# Altium footprint library SamacSys.PcbLib: 1008 footprints (part 31 of 63)
Each footprint in its own frame and in the unit in brackets; x right, y up, seen from the top. Pads: shape width x height; smd on the part's side, far side on the other; paste and mask are expansions set on the pad; w line width, h text height; cw(c..) or ccw(c..) is an arc to the next point about the centre after c.
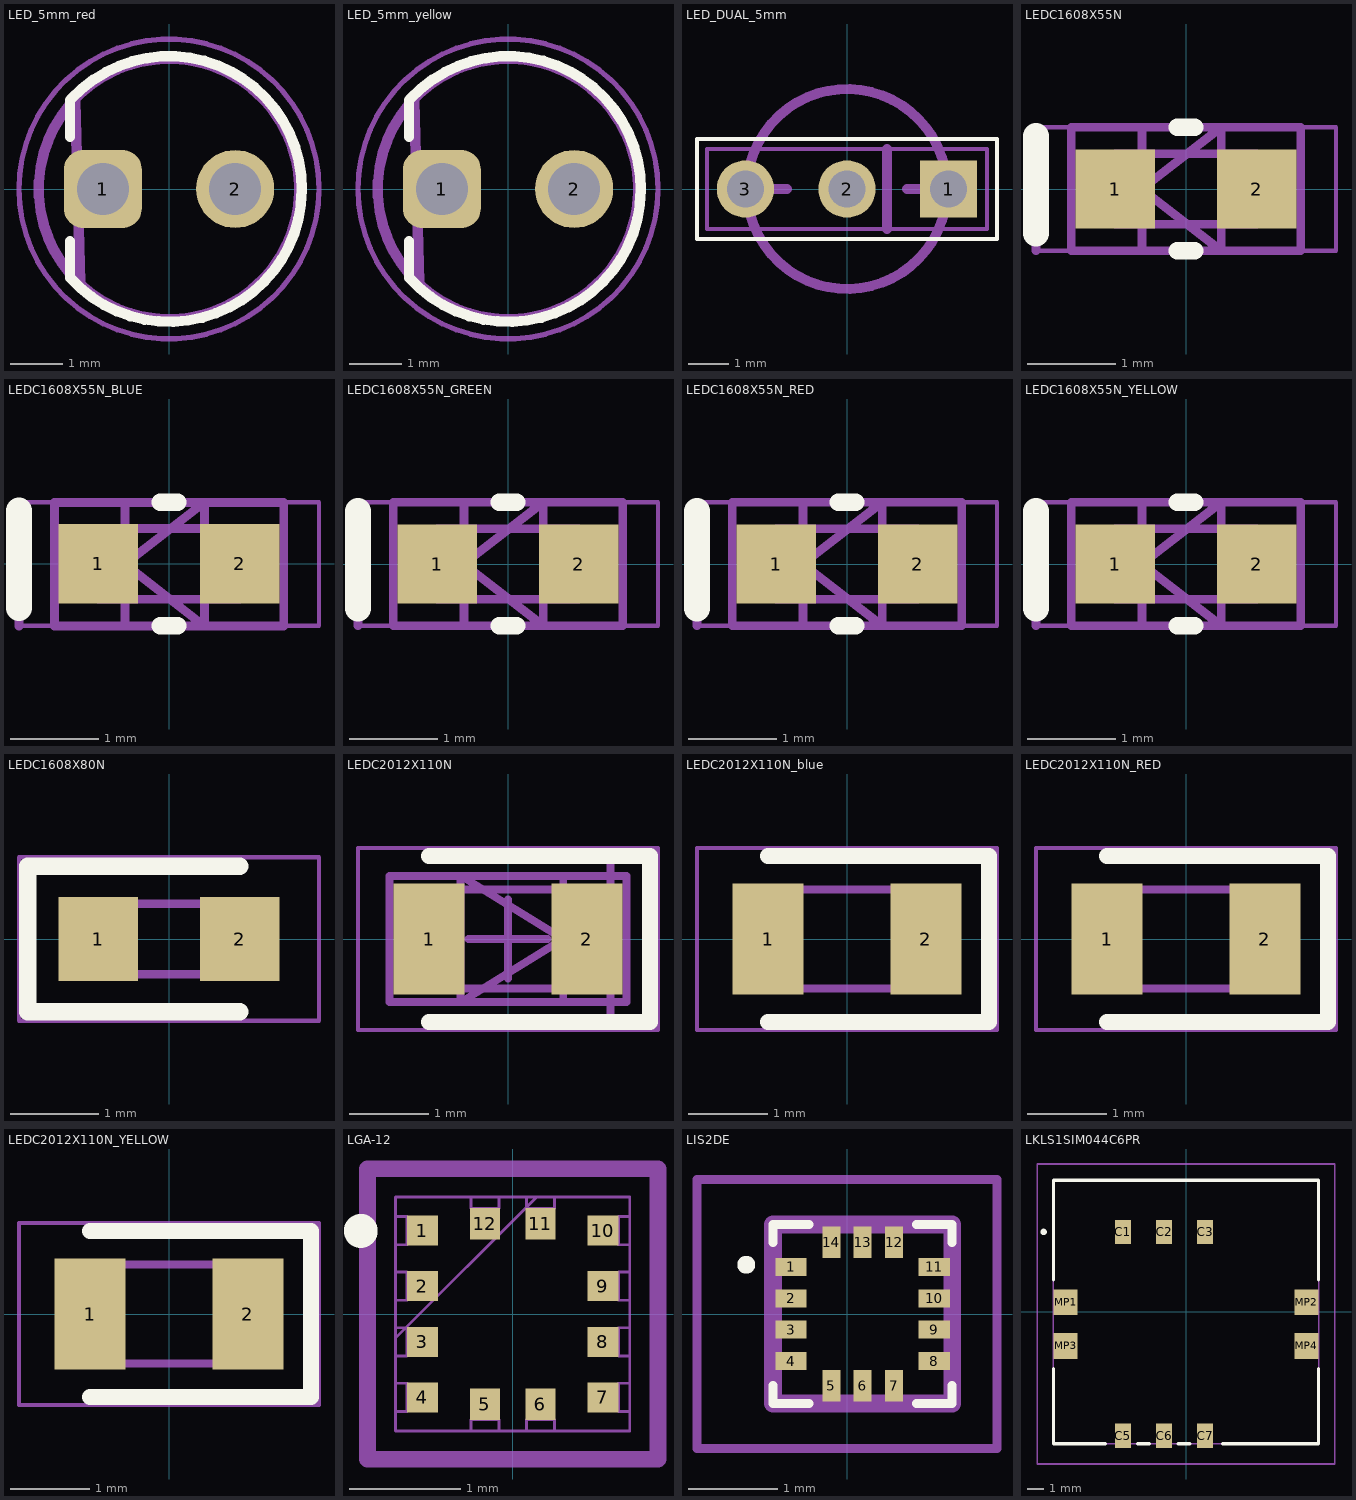
[diagram p30: the footprints below, top view; thin cyan lines are the x and y axes]

## LED_5mm_red [mm]
pads (2):
  rrect50% 1.5x1.5 hole 1: 1(-1.27,0)
  round 1.5 hole 1: 2(1.27,0)
Top Overlay:
  lines w0.2: -1.9,-1 -1.9,-1.7 ccw(c0,0) -1.873,1.729 ; -1.9,1 -1.9,1.7
Assembly:
  circle w0.2: c0,0 r2.5
  lines w0.2: -1.8,1.7 -1.7,-1.8
Countryard:
  circle w0.1: c0,0 r2.879
3D body "LED D5 - Red.step": height 19.6, standoff -15.4, extent -2.5,-2.944 2.95,2.944

## LED_5mm_yellow [mm]
pads (2):
  rrect50% 1.5x1.5 hole 1: 1(-1.27,0)
  round 1.5 hole 1: 2(1.27,0)
Top Overlay:
  lines w0.2: -1.9,-1 -1.9,-1.7 ccw(c0,0) -1.873,1.729 ; -1.9,1 -1.9,1.7
Assembly:
  circle w0.2: c0,0 r2.5
  lines w0.2: -1.8,1.7 -1.7,-1.8
Countryard:
  circle w0.1: c0,0 r2.879
3D body "LED D5 - Yellow.step": height 19.6, standoff -15.4, extent -2.409,-3.022 3.041,2.866

## LED_DUAL_5mm [mm] "LED 5MM, BI-COLOR"
pads (3):
  rect 1.431x1.431 hole 0.92: 1(2.54,0)
  round 1.431 hole 0.92: 2(0,0) 3(-2.54,0)
Top Overlay:
  lines w0.1: -3.75,-1.25 3.75,-1.25 3.75,1.25 -3.75,1.25 -3.75,-1.25
Top Assembly:
  circle w0.25: c0,0 r2.5
  lines w0.25: -2.54,0 -1.5,0 ; 1,-1 1,1 ; 1.5,0 2.54,0
Top Courtyard:
  lines w0.1: -3.5,-1 3.5,-1 3.5,1 -3.5,1 -3.5,-1
3D body "Bi-Color LED - Common Cathode v3.step": height 24.3, standoff -9.5, extent -2.79,-1.986 2.75,1.786

## LEDC1608X55N [mm]
pads (2):
  rect 0.9x0.9 smd: 1(-0.8,0) 2(0.8,0)
Top Overlay:
  lines w0.2: -0.1,-0.7 0.1,-0.7 ; -0.1,0.7 0.1,0.7
  lines w0.3: -1.7,-0.5 -1.7,0.6
Top Assembly:
  lines w0.1: -1.7,-0.7 -1.7,0.7 ; -0.5,-0.7 -0.5,0.7 ; -1.3,-0.7 1.3,-0.7 1.3,0.7 -1.3,0.7 -1.3,-0.7 ; -0.5,0 0.4,0.7 0.4,-0.7 -0.5,0
Assembly:
  lines w0.1: -0.8,0.133 -0.533,0.4 ; -0.8,-0.4 -0.8,0.4 0.8,0.4 0.8,-0.4 -0.8,-0.4
Countryard:
  lines w0.05: -1.7,-0.7 -1.7,0.7 1.7,0.7 1.7,-0.7 -1.7,-0.7
3D body "LTST-C191KGKT.stp": height 0.55, standoff 0, extent -0.83,-0.4 0.77,0.4

## LEDC1608X55N_BLUE [mm]
pads (2):
  rect 0.9x0.9 smd: 1(-0.8,0) 2(0.8,0)
Top Overlay:
  lines w0.2: -0.1,-0.7 0.1,-0.7 ; -0.1,0.7 0.1,0.7
  lines w0.3: -1.7,-0.5 -1.7,0.6
Top Assembly:
  lines w0.1: -1.699,-0.702 -1.699,0.698 ; -0.499,-0.702 -0.499,0.698 ; -1.299,-0.702 1.301,-0.702 1.301,0.698 -1.299,0.698 -1.299,-0.702 ; -0.499,-0.002 0.401,-0.702 0.401,0.698 -0.499,-0.002
Assembly:
  lines w0.1: -0.8,0.133 -0.533,0.4 ; -0.8,-0.4 -0.8,0.4 0.8,0.4 0.8,-0.4 -0.8,-0.4
Countryard:
  lines w0.05: -1.7,-0.7 -1.7,0.7 1.7,0.7 1.7,-0.7 -1.7,-0.7
3D body "SMD_0603LED_BLUE.STEP": height 0.88, standoff 0, extent -0.838,-0.5 0.778,0.5

## LEDC1608X55N_GREEN [mm]
pads (2):
  rect 0.9x0.9 smd: 1(-0.8,0) 2(0.8,0)
Top Overlay:
  lines w0.2: -0.1,-0.7 0.1,-0.7 ; -0.1,0.7 0.1,0.7
  lines w0.3: -1.7,-0.5 -1.7,0.6
Top Assembly:
  lines w0.1: -1.7,-0.7 -1.7,0.7 ; -0.5,-0.7 -0.5,0.7 ; -1.3,-0.7 1.3,-0.7 1.3,0.7 -1.3,0.7 -1.3,-0.7 ; -0.5,0 0.4,-0.7 0.4,0.7 -0.5,0
Assembly:
  lines w0.1: -0.8,0.133 -0.533,0.4 ; -0.8,-0.4 -0.8,0.4 0.8,0.4 0.8,-0.4 -0.8,-0.4
Countryard:
  lines w0.05: -1.7,-0.7 -1.7,0.7 1.7,0.7 1.7,-0.7 -1.7,-0.7
3D body "SMD_0603LED_GREEN.STEP": height 0.88, standoff 0, extent -0.838,-0.5 0.778,0.5

## LEDC1608X55N_RED [mm]
pads (2):
  rect 0.9x0.9 smd: 1(-0.8,0) 2(0.8,0)
Top Overlay:
  lines w0.2: -0.1,-0.7 0.1,-0.7 ; -0.1,0.7 0.1,0.7
  lines w0.3: -1.7,-0.5 -1.7,0.6
Top Assembly:
  lines w0.1: -1.7,-0.7 -1.7,0.7 ; -0.5,-0.7 -0.5,0.7 ; -1.3,-0.7 1.3,-0.7 1.3,0.7 -1.3,0.7 -1.3,-0.7 ; -0.5,0 0.4,-0.7 0.4,0.7 -0.5,0
Assembly:
  lines w0.1: -0.8,0.133 -0.533,0.4 ; -0.8,-0.4 0.8,-0.4 0.8,0.4 -0.8,0.4 -0.8,-0.4
Countryard:
  lines w0.05: -1.7,-0.7 1.7,-0.7 1.7,0.7 -1.7,0.7 -1.7,-0.7
3D body "SMD_0603LED_RED.STEP": height 0.88, standoff 0, extent -0.838,-0.5 0.778,0.5

## LEDC1608X55N_YELLOW [mm]
pads (2):
  rect 0.9x0.9 smd: 1(-0.8,0) 2(0.8,0)
Top Overlay:
  lines w0.2: -0.1,-0.7 0.1,-0.7 ; -0.1,0.7 0.1,0.7
  lines w0.3: -1.7,-0.5 -1.7,0.6
Top Assembly:
  lines w0.1: -1.7,-0.7 -1.7,0.7 ; -0.5,-0.7 -0.5,0.7 ; -1.3,-0.7 1.3,-0.7 1.3,0.7 -1.3,0.7 -1.3,-0.7 ; -0.5,0 0.4,0.7 0.4,-0.7 -0.5,0
Assembly:
  lines w0.1: -0.8,0.133 -0.533,0.4 ; -0.8,-0.4 -0.8,0.4 0.8,0.4 0.8,-0.4 -0.8,-0.4
Countryard:
  lines w0.05: -1.7,-0.7 -1.7,0.7 1.7,0.7 1.7,-0.7 -1.7,-0.7
3D body "SMD_0603LED_YEL.STEP": height 0.88, standoff 0, extent -0.838,-0.5 0.778,0.5

## LEDC1608X80N [mm]
pads (2):
  rect 0.9x0.95 smd: 1(-0.8,0) 2(0.8,0)
Top Overlay:
  lines w0.2: 0.8,-0.825 -1.6,-0.825 -1.6,0.825 0.8,0.825
Assembly:
  lines w0.1: -0.8,0.133 -0.533,0.4 ; -0.8,-0.4 0.8,-0.4 0.8,0.4 -0.8,0.4 -0.8,-0.4
Countryard:
  lines w0.05: -1.7,-0.925 1.7,-0.925 1.7,0.925 -1.7,0.925 -1.7,-0.925
3D body "LTST-C190KGKT.stp": height 0.8, standoff 0, extent -0.83,-0.4 0.77,0.4

## LEDC2012X110N [mm]
pads (2):
  rect 0.9x1.4 smd: 1(-1,0) 2(1,0)
Top Overlay:
  lines w0.2: -1,-1.05 1.8,-1.05 1.8,1.05 -1,1.05
Top Assembly:
  lines w0.1: 0.7,-0.8 0.7,0.8 ; -1.5,-0.8 -1.5,0.8 1.5,0.8 1.5,-0.8 -1.5,-0.8 ; -0.6,-0.8 0.7,0 -0.6,0.8 -0.6,-0.8
Assembly:
  lines w0.1: -1,0.208 -0.583,0.625 ; -1,-0.625 1,-0.625 1,0.625 -1,0.625 -1,-0.625
Countryard:
  lines w0.05: -1.9,-1.15 1.9,-1.15 1.9,1.15 -1.9,1.15 -1.9,-1.15
  lines w0.1: -0.5,0 0.5,0 ; 0,-0.5 0,0.5 ; 1.3,-1.1 1.3,1.1
3D body "User Library-KP-2012.step": height 1.1, standoff 0, extent -1.001,-0.625 1.001,0.625

## LEDC2012X110N_blue [mm]
pads (2):
  rect 0.9x1.4 smd: 1(-1,0) 2(1,0)
Top Overlay:
  lines w0.2: -1,-1.05 1.8,-1.05 1.8,1.05 -1,1.05
Assembly:
  lines w0.1: -1,0.208 -0.583,0.625 ; -1,-0.625 -1,0.625 1,0.625 1,-0.625 -1,-0.625
Countryard:
  lines w0.05: -1.9,-1.15 -1.9,1.15 1.9,1.15 1.9,-1.15 -1.9,-1.15
3D body "everlight-17-21-0805LED-BLUE.step": height 1.1, standoff -0.01, extent -1,-0.625 1,0.625

## LEDC2012X110N_RED [mm]
pads (2):
  rect 0.9x1.4 smd: 1(-1,0) 2(1,0)
Top Overlay:
  lines w0.2: -1,-1.05 1.8,-1.05 1.8,1.05 -1,1.05
Assembly:
  lines w0.1: -1,0.208 -0.583,0.625 ; -1,-0.625 1,-0.625 1,0.625 -1,0.625 -1,-0.625
Countryard:
  lines w0.05: -1.9,-1.15 1.9,-1.15 1.9,1.15 -1.9,1.15 -1.9,-1.15
3D body "User Library-CHIPLED-0805.step": height 0.9, standoff -0.01, extent -1.05,-0.675 1.05,0.675

## LEDC2012X110N_YELLOW [mm]
pads (2):
  rect 0.9x1.4 smd: 1(-1,0) 2(1,0)
Top Overlay:
  lines w0.2: -1,-1.05 1.8,-1.05 1.8,1.05 -1,1.05
Assembly:
  lines w0.1: -1,0.208 -0.583,0.625 ; -1,-0.625 1,-0.625 1,0.625 -1,0.625 -1,-0.625
Countryard:
  lines w0.05: -1.9,-1.15 1.9,-1.15 1.9,1.15 -1.9,1.15 -1.9,-1.15
3D body "SMD_0805LED_YEL.STEP": height 1.1, standoff 0, extent -1.01,-0.625 1.01,0.625

## LGA-12 [mm]
pads (12):
  rect 0.28x0.27 smd paste+0 mask+0: 1(-0.813,0.75) 2(-0.813,0.25) 3(-0.813,-0.25) 4(-0.813,-0.75) 7(0.813,-0.75) 8(0.813,-0.25) 9(0.813,0.25) 10(0.813,0.75)
  rect 0.27x0.28 smd paste+0 mask+0: 5(-0.25,-0.813) 6(0.25,-0.813) 11(0.25,0.813) 12(-0.25,0.813)
Top Overlay:
  circle w0.254: c-1.368,0.748 r0.025
Assembly:
  lines w0.025: -1.054,-0.216 0.216,1.054 ; -1.054,-1.054 1.054,-1.054 1.054,1.054 -1.054,1.054 -1.054,-1.054 ; -1.054,-0.877 -1.054,-0.623 -0.953,-0.623 -0.953,-0.877 -1.054,-0.877 ; -1.054,-0.377 -1.054,-0.123 -0.953,-0.123 -0.953,-0.377 -1.054,-0.377 ; -1.054,0.123 -1.054,0.377 -0.953,0.377 -0.953,0.123 -1.054,0.123 ; -1.054,0.623 -1.054,0.877 -0.953,0.877 -0.953,0.623 -1.054,0.623 ; -0.377,-1.054 -0.123,-1.054 -0.123,-0.953 -0.377,-0.953 -0.377,-1.054 ; -0.377,0.953 -0.123,0.953 -0.123,1.054 -0.377,1.054 -0.377,0.953 ; 0.123,-1.054 0.377,-1.054 0.377,-0.953 0.123,-0.953 0.123,-1.054 ; 0.123,0.953 0.377,0.953 0.377,1.054 0.123,1.054 0.123,0.953 ; 0.953,-0.877 1.054,-0.877 1.054,-0.623 0.953,-0.623 0.953,-0.877 ; 0.953,-0.377 1.054,-0.377 1.054,-0.123 0.953,-0.123 0.953,-0.377 ; 0.953,0.123 1.054,0.123 1.054,0.377 0.953,0.377 0.953,0.123 ; 0.953,0.623 1.054,0.623 1.054,0.877 0.953,0.877 0.953,0.623
Countryard:
  lines w0.152: -1.308,-1.308 -1.308,-1.131 -1.308,1.131 -1.308,1.308 -0.631,1.308 0.631,1.308 1.308,1.308 1.308,1.131 1.308,-1.131 1.308,-1.308 0.631,-1.308 -0.631,-1.308 -1.308,-1.308
3D body "LGA-12_2X2X0P86_STM.step": height 0.87, standoff 0, extent -1.054,-1.054 1.054,1.054

## LIS2DE [mm]
pads (14):
  rect 0.35x0.2 smd: 1(-0.625,0.525) 2(-0.625,0.175) 3(-0.625,-0.175) 4(-0.625,-0.525) 8(0.975,-0.525) 9(0.975,-0.175) 10(0.975,0.175) 11(0.975,0.525)
  rect 0.2x0.35 smd: 5(-0.175,-0.8) 6(0.175,-0.8) 7(0.525,-0.8) 12(0.525,0.8) 13(0.175,0.8) 14(-0.175,0.8)
Top Overlay:
  lines w0.1: -0.825,-0.8 -0.825,-1 -0.425,-1 ; -0.825,0.8 -0.825,1 -0.425,1 ; 0.775,-1 1.175,-1 1.175,-0.8 ; 0.775,1 1.175,1 1.175,0.8 ; -1.125,0.5 cw(c-1.125,0.55) -1.125,0.6 cw(c-1.125,0.55) -1.125,0.5
Assembly:
  lines w0.2: -0.825,-1 -0.825,1 1.175,1 1.175,-1 -0.825,-1
Countryard:
  lines w0.1: -1.675,-1.5 -1.675,1.5 1.675,1.5 1.675,-1.5 -1.675,-1.5
3D body "LIS2DE.stp": height 2.1, standoff 0, extent -0.825,-1 1.175,1

## LKLS1SIM044C6PR [mm]
pads (10):
  rect 1x1.5 smd: C1(-3.9,4.95) C2(-1.36,4.95) C3(1.18,4.95) C5(-3.9,-7.65) C6(-1.36,-7.65) C7(1.18,-7.65)
  rect 1.5x1.6 smd: MP1(-7.45,0.6) MP2(7.45,0.6) MP3(-7.45,-2.1) MP4(7.45,-2.1)
Top Overlay:
  lines w0.2: -8.9,4.95 ccw(c-8.8,4.95) -8.7,4.95 ; -8.9,4.95 cw(c-8.8,4.95) -8.7,4.95 ; -8.9,4.95 ccw(c-8.8,4.95) -8.7,4.95 ; -8.2,-8.15 -8.2,-3.5 -8.2,-8.15 ; -8.2,-8.15 -5,-8.15 -8.2,-8.15 ; -8.2,8.15 -8.2,2 -8.2,8.15 ; -8.2,8.15 8.2,8.15 ; -8.2,8.15 8.2,8.15 ; 8.2,-8.15 8.2,-3.5 8.2,-8.15 ; 8.2,-8.15 2.25,-8.15 8.2,-8.15 ; 8.2,8.15 8.2,2 8.2,8.15 ; -3,-8.15 -2.25,-8.15 -3,-8.15 ; -0.5,-8.15 0.25,-8.15 -0.5,-8.15
Assembly:
  lines w0.1: -8.2,-8.15 -8.2,8.15 8.2,8.15 8.2,-8.15 -8.2,-8.15
Countryard:
  lines w0.1: -9.2,-9.4 -9.2,9.15 9.2,9.15 9.2,-9.4 -9.2,-9.4
3D body "L-KLS1-SIM-044C-6P-R.stp": height 1.95, standoff 0, extent -8.2,-8.3 8.2,8.15